# Altium schematic symbol library TitansLib.SchLib: 462 symbols (part 1 of 24)
Pins are listed as number, name and electrical type; pins without a type are passive.

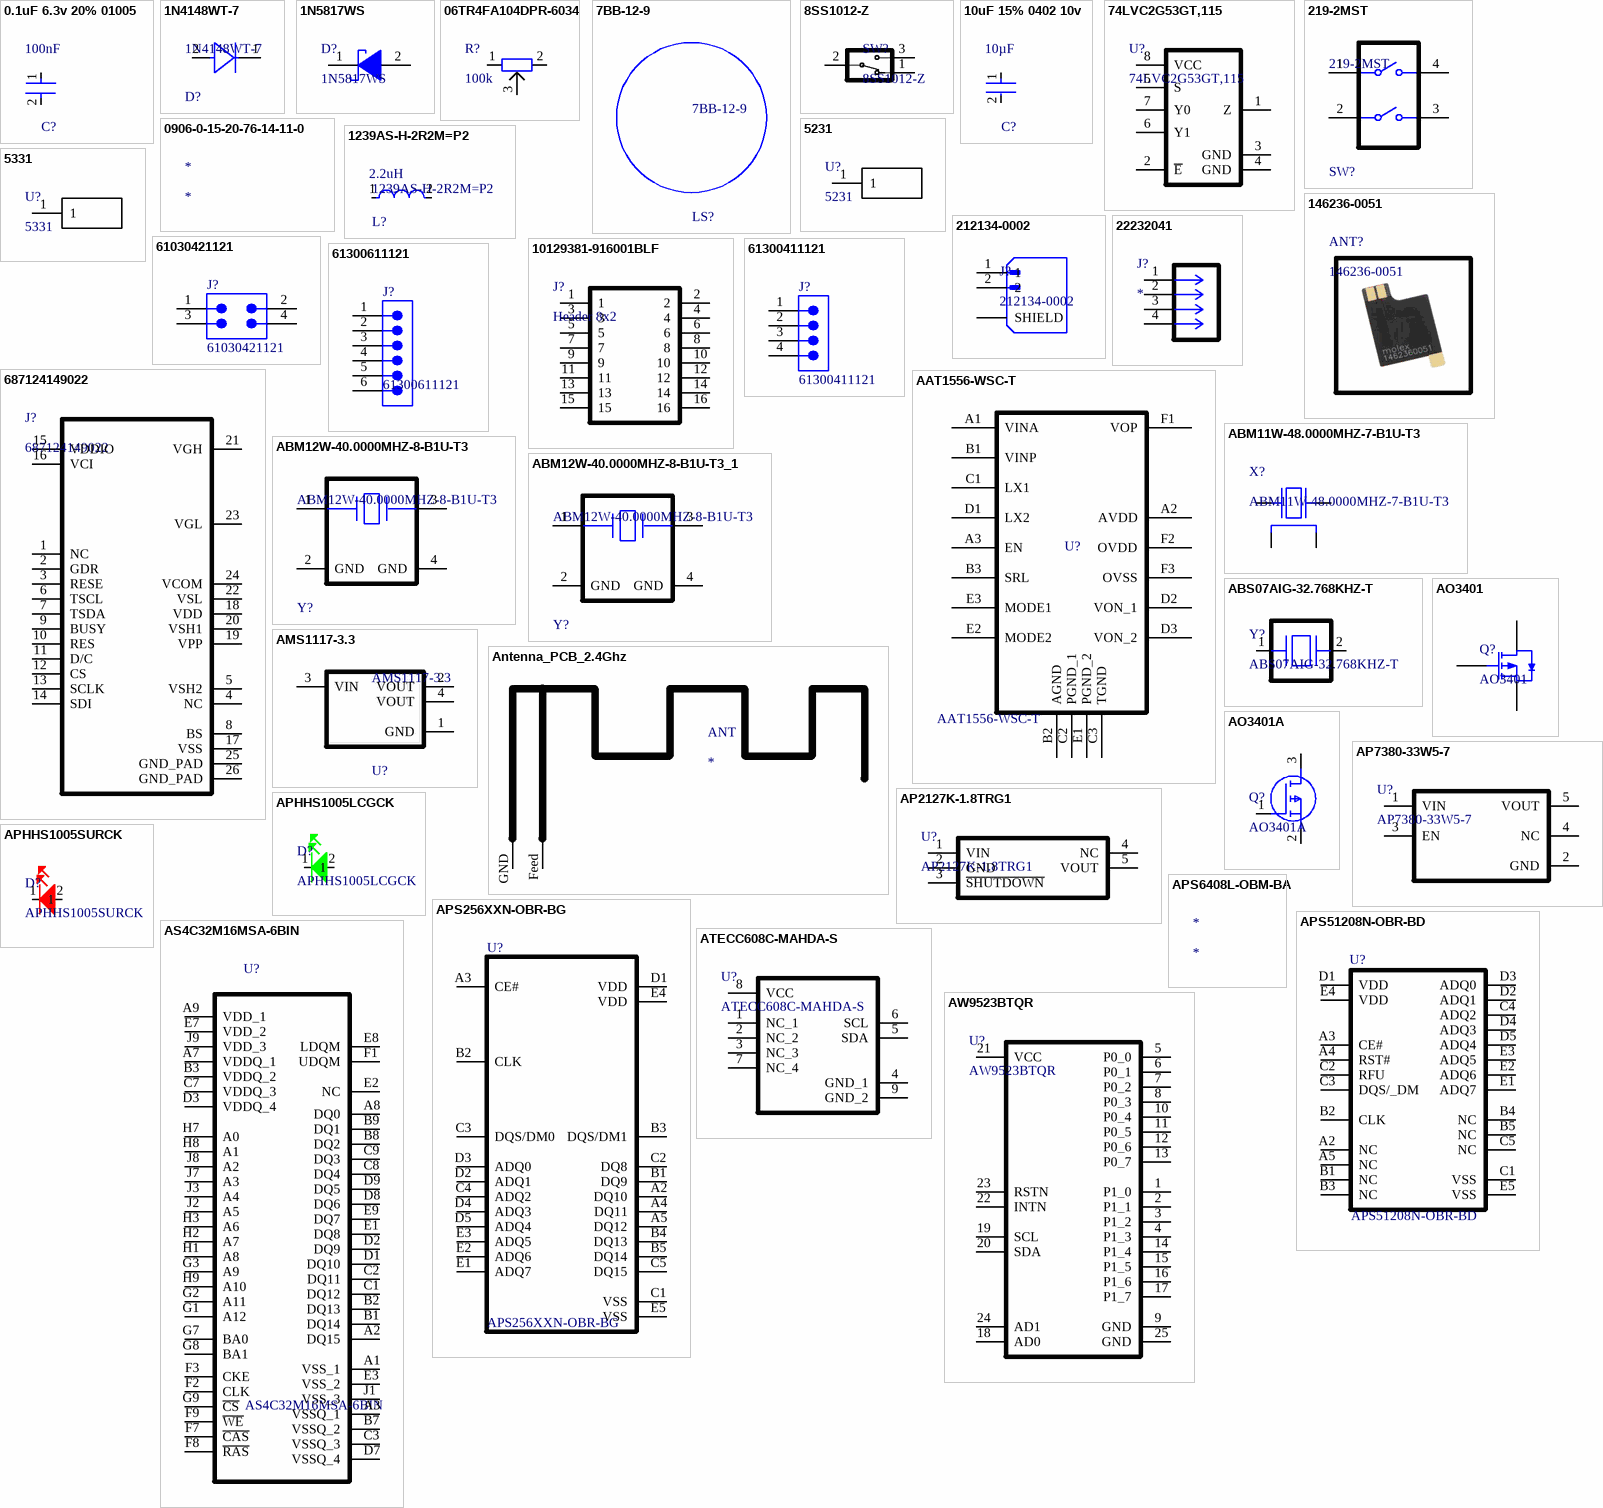
[diagram p0: symbols 0.1uF 6.3v 20% 01005 to AW9523BTQR]

## 0.1uF 6.3v 20% 01005
designator C?, comment value 100nF  (hidden comment: GRM022R60J104ME15L)
Chip Multilayer Ceramic Capacitors for General Purpose, 01005, 0.10uF, X5R, 15%, 20%, 6.3V; Manufacturer: Murata; Manufacturer Lifecycle Status: IN PRODUCTION; Supplier: Avnet; Supplier Part Number: GRM022R60J104ME15L; Manufacturer Part Number: GRM022R60J104ME15L; RoHS: Compliant; Category: Ceramic Capacitors; Stock: 200000; Pricing: 40000=0,00211, 80000=0,00209, 160000=0,00206, 320000=0,00203, 640000=0,002 (USD); Case/Package: 0402; Case Code (Imperial): 1005; Case Code (Metric): 1005; Dielectric: X5R; Dielectric Material: Ceramic; Height: 200µm; Lead Free: Lead Free; Lead Pitch: 5.8928mm; Length: 400µm; Lifecycle Status: Production; Material: Ceramic; Max Operating Temperature: 85°C; Min Operating Temperature: -55°C; Mounting Technology: Surface Mount; Number of Terminals: 2; REACH SVHC: Yes; Schedule B: 8532240020, 8532240020|8532240020, 8532240020|8532240020|8532240020, 8532240020|8532240020|8532240020|8532240020; Termination: SMD/SMT; Thickness: 200µm; Tolerance: 20%; Voltage Rating: 6.3V; Voltage Rating (DC): 6.3V; Weight: 6.010099mg; Width: 200µm; ComponentLink1URL: https://datasheet.octopart.com:443/GRM022R60J104ME15L-Murata-datasheet-165579666.pdf?src-supplier=TME; ComponentLink1Description: https://datasheet.octopart.com:443/GRM022R60J104ME15L-Murata-datasheet-165579666.pdf?src-supplier=TME; ComponentLink2URL: https://datasheet.octopart.com:443/GRM022R60J104ME15L-Murata-datasheet-141273904.pdf?src-supplier=Ciiva; ComponentLink2Description: https://datasheet.octopart.com:443/GRM022R60J104ME15L-Murata-datasheet-141273904.pdf?src-supplier=Ciiva; ComponentLink3URL: https://datasheet.octopart.com:443/GRM022R60J104ME15L-Murata-datasheet-140673554.pdf?src-supplier=Ciiva; ComponentLink3Description: https://datasheet.octopart.com:443/GRM022R60J104ME15L-Murata-datasheet-140673554.pdf?src-supplier=Ciiva; ComponentLink4URL: https://datasheet.octopart.com:443/GRM022R60J104ME15L-Murata-datasheet-138736326.pdf?src-supplier=Ciiva; ComponentLink4Description: https://datasheet.octopart.com:443/GRM022R60J104ME15L-Murata-datasheet-138736326.pdf?src-supplier=Ciiva; ComponentLink5URL: https://datasheet.octopart.com:443/GRM022R60J104ME15L-Murata-datasheet-32479577.pdf?src-supplier=HQonline; ComponentLink5Description: https://datasheet.octopart.com:443/GRM022R60J104ME15L-Murata-datasheet-32479577.pdf?src-supplier=HQonline; ComponentLink6URL: https://datasheet.octopart.com:443/GRM022R60J104ME15L-Murata-datasheet-22122223.pdf?src-supplier=Future+Electronics; ComponentLink6Description: https://datasheet.octopart.com:443/GRM022R60J104ME15L-Murata-datasheet-22122223.pdf?src-supplier=Future+Electronics; ComponentLink7URL: https://datasheet.octopart.com/GRM022R60J104ME15L-Murata-datasheet-12515295.pdf; ComponentLink7Description: https://datasheet.octopart.com/GRM022R60J104ME15L-Murata-datasheet-12515295.pdf; ComponentLink8URL: https://datasheet.octopart.com/GRM022R60J104ME15L-Murata-datasheet-12510076.pdf; ComponentLink8Description: https://datasheet.octopart.com/GRM022R60J104ME15L-Murata-datasheet-12510076.pdf; ComponentLink9URL: https://datasheet.octopart.com/GRM022R60J104ME15L-Murata-datasheet-11978611.pdf; ComponentLink9Description: https://datasheet.octopart.com/GRM022R60J104ME15L-Murata-datasheet-11978611.pdf; ComponentLink10URL: https://datasheet.octopart.com/GRM022R60J104ME15L-Murata-datasheet-10025737.pdf; ComponentLink10Description: https://datasheet.octopart.com/GRM022R60J104ME15L-Murata-datasheet-10025737.pdf; ComponentLink11URL: https://datasheet.octopart.com/GRM022R60J104ME15L-Murata-datasheet-8819587.pdf; ComponentLink11Description: https://datasheet.octopart.com/GRM022R60J104ME15L-Murata-datasheet-8819587.pdf; ComponentLink12URL: https://datasheet.octopart.com/GRM022R60J104ME15L-Murata-datasheet-14395189.pdf; ComponentLink12Description: https://datasheet.octopart.com/GRM022R60J104ME15L-Murata-datasheet-14395189.pdf; ComponentLink13URL: http://sigma.octopart.com:80/reach_statement/Murata-company-16.pdf?src-supplier=Compliance+Statements; ComponentLink13Description: http://sigma.octopart.com:80/reach_statement/Murata-company-16.pdf?src-supplier=Compliance+Statements
footprint CAPC0402X02L (Chip Capacitor, 2-Leads, Body 0.40x0.20mm, IPC High Density)
pins: 1, 2

## 1N4148WT-7
designator D?
DIODE GEN PURP 80V 125MA SOD523; Power Rating: 150mW; Peak Non-Repetitive Surge Current: 2A; Forward Voltage: 1.25V; Reverse Recovery Time: 4ns; Peak Reverse Current: 1uA; Max Repetitive Reverse Voltage (Vrrm): 100V; Capacitance: 2pF; Polarity: Standard; Element Configuration: Single; Forward Current: 250mA; Lead Free: Lead Free; Packaging: Tape and Reel; Length: 0.9mm; Min Operating Temperature: -65°C; Current Rating: 125mA; Max Reverse Voltage (DC): 80V; Width: 1.3mm; Package Quantity: 3000; Output Current: 125mA; Power Dissipation: 150mW; Max Operating Temperature: 150°C; Radiation Hardening: No; Average Rectified Current: 125mA; Height: 0.65mm; Voltage Rating (DC): 80V; Max Surge Current: 2A; Weight: 3.5E-05oz; Recovery Time: 4ns; Max Forward Surge Current (Ifsm): 2A; Contact Plating: Tin; Number of Pins: 2; Mount: Surface Mount; REACH SVHC: No SVHC; Supplier 1: Mouser; Supplier Part Number 1: 621-1N4148WT
footprint 1N4148WT-7 (SODFL, 2-Leads, Body 0,80x1,60mm, IPC Low Density)
pins: 1 C, 2 A

## 1N5817WS
designator D?
Diode Independent 20V 1A Surface Mount SOD-323; Manufacturer Name 1: CBI; Datasheet Link: https://www.lcsc.com/datasheet/C2828424.pdf; Height: 1.35mm; Manufacturer Part Number 1: 1N5817WS; Supplier 1: LCSC; Supplier Link 1: https://www.lcsc.com/product-detail/C2828424.html; Supplier Part Number 1: C2828424; Supplier Unit Price 1: 0.0217
footprint SOD2613X110N
pins: 1 K, 2 A

## 06TR4FA104DPR-6034
designator R?, comment 100k
Trimmer Resistors - SMD 6mm Trimmer 100kOhm 25% HSMD; Manufacturer: CTS; Manufacturer Part Number: 06TR4FA104DPR; Supplier: Mouser; Supplier Part Number: 774-06TR4FA104DPR; RoHS: Yes; Category: Trimmer; Stock: 1498; Pricing: 1=0.67, 10=0.565, 100=0.476, 500=0.42,1 1200=0.361 (USD); Resistor Type: Variable; Reach SVHC Compliant: Yes; RoHS Compliant: Yes; ComponentLink1URL: https://www.mouser.com/ProductDetail/CTS-Electronic-Components/06TR4FA104DPR?qs=dbcCsuKDzFX9WkkidUqJ3g%3D%3D&srsltid=AfmBOop_COOrXBpqK8YDp2e4mr-jayDMNgkXQMHWR55lB1NNJLdGUN-R; ComponentLink1Description: https://datasheet.ciiva.com:443/pdfs/VipMasterIC/IC/SGST/SGST-S-A0006719383/SGST-S-A0006719383-1.pdf?src-supplier=IHS+Markit; ComponentLink2Description: http://www.st.com/resource/en/datasheet/esdavlc6-2bly.pdf?src-supplier=Digikey
footprint TRIMMER
pins: 1, 2, 3 GND (power)

## 7BB-12-9
designator LS?
Audio Indicator Diaphragm Piezo Wire Lead 8000Hz to 10000Hz; Manufacturer: Murata; Value: 8nF; Frequency: 9kHz; Impedance: 1kΩ; Insulation Resistance: 100MΩ; Clock Frequency: 10kHz; Max Supply Voltage: 3V; Outside Diameter: 12mm; Supplier: Mouser; Supplier Part Number: 81-7BB-12-9; Manufacturer Part Number: 7BB-12-9; RoHS: Compliant; Category: Speakers; Pricing: 1=0.35, 10=0.263, 50=0.219, 100=0.203, 1000=0.163, 10000=0.161 (USD); Case/Package: SMD/SMT; Country of Origin: Thailand; Diameter: 12mm; Height: 320µm; Housing Material: Brass; Introduction Date: 2015-12-27; Lead Free: Lead Free; Lifecycle Status: Obsolete; Max Operating Temperature: 70°C; Min Operating Temperature: -20°C; Mounting Technology: Surface Mount; Packaging: Bulk; Radiation Hardening: No; REACH SVHC: No; Schedule B: 8531800040, 8531800040|8531800040|8531800040|8531800040|8531800040; Self Resonant Frequency: 9kHz; Termination: Wire; ComponentLink1URL: https://datasheet.octopart.com:443/7BB-12-9-Murata-datasheet-14713187.pdf?src-supplier=element14+APAC; ComponentLink1Description: https://datasheet.octopart.com:443/7BB-12-9-Murata-datasheet-14713187.pdf?src-supplier=element14+APAC; ComponentLink2URL: https://datasheet.octopart.com:443/7BB-12-9-Murata-datasheet-514046.pdf?src-supplier=Newark; ComponentLink2Description: https://datasheet.octopart.com:443/7BB-12-9-Murata-datasheet-514046.pdf?src-supplier=Newark; ComponentLink3URL: https://datasheet.octopart.com:443/7BB-12-9-Murata-datasheet-138706124.pdf?src-supplier=Ciiva; ComponentLink3Description: https://datasheet.octopart.com:443/7BB-12-9-Murata-datasheet-138706124.pdf?src-supplier=Ciiva; ComponentLink4URL: https://datasheet.octopart.com:443/7BB-12-9-Murata-datasheet-118636348.pdf?src-supplier=ODG+(Origin+Data+Global); ComponentLink4Description: https://datasheet.octopart.com:443/7BB-12-9-Murata-datasheet-118636348.pdf?src-supplier=ODG+(Origin+Data+Global); ComponentLink5URL: https://datasheet.octopart.com:443/7BB-12-9-Murata-datasheet-140568401.pdf?src-supplier=Arrow.cn; ComponentLink5Description: https://datasheet.octopart.com:443/7BB-12-9-Murata-datasheet-140568401.pdf?src-supplier=Arrow.cn; ComponentLink6URL: https://datasheet.octopart.com/7BB-12-9-Murata-datasheet-32036507.pdf; ComponentLink6Description: https://datasheet.octopart.com/7BB-12-9-Murata-datasheet-32036507.pdf; ComponentLink7URL: https://datasheet.octopart.com:443/7BB-12-9-Murata-datasheet-17793854.pdf?src-supplier=Farnell; ComponentLink7Description: https://datasheet.octopart.com:443/7BB-12-9-Murata-datasheet-17793854.pdf?src-supplier=Farnell; ComponentLink8URL: https://datasheet.octopart.com:443/7BB-12-9-Murata-datasheet-11978949.pdf?src-supplier=_legacy+Avnet; ComponentLink8Description: https://datasheet.octopart.com:443/7BB-12-9-Murata-datasheet-11978949.pdf?src-supplier=_legacy+Avnet; ComponentLink9URL: https://datasheet.octopart.com:443/7BB-12-9-Murata-datasheet-166693676.pdf?src-supplier=TME; ComponentLink9Description: https://datasheet.octopart.com:443/7BB-12-9-Murata-datasheet-166693676.pdf?src-supplier=TME; ComponentLink10URL: https://datasheet.octopart.com:443/7BB-12-9-Murata-datasheet-541598.pdf?src-supplier=Future+Electronics; ComponentLink10Description: https://datasheet.octopart.com:443/7BB-12-9-Murata-datasheet-541598.pdf?src-supplier=Future+Electronics; ComponentLink11URL: http://sigma.octopart.com:80/reach_statement/Murata-company-16.pdf?src-supplier=Compliance+Statements; ComponentLink11Description: http://sigma.octopart.com:80/reach_statement/Murata-company-16.pdf?src-supplier=Compliance+Statements
footprint 7BB-12-9

## 8SS1012-Z
designator SW?
Switch Slide ON ON SPDT Top Slide 6A 250VAC 30VDC 100000Cycles PC Pins Thru-Hole Bag; Manufacturer_Name: Nidec Copal Electronics; Manufacturer: Nidec Copal; Actuator Length: 5mm; Contact Style: Non-Shorting; Current Rating: 4A; Electrical Life: 30kcycles; Mechanical Life: 100kcycles; Switch Function: On-On; Switch Travel: 2.2mm; Voltage Rating (AC): 125V; Voltage Rating (DC): 30V; Type: Slide Switches; Copyright: Copyright (C) 2025 Ultra Librarian. All rights reserved.; Manufacturer_Part_Number: 8SS1012-Z; RefDes: RefDes; Supplier: Arrow Electronics; Supplier Part Number: 8SS1012-Z; Manufacturer Part Number: 8SS1012-Z; RoHS: Compliant; Category: Slide Switches; Stock: 1202; Pricing: 2=1,567 (USD); Contact Current Rating: 6A; Contact Plating: Silver; Export Control Classification Number (ECCN) Code: EAR99; Harmonized Tariff Schedule (HTS) Code: 8536.50.70.00; Introduction Date: 2016-11-16; Lifecycle Status: Production; Max Operating Temperature: 85°C; Min Operating Temperature: -30°C; Mounting Technology: Through Hole; Orientation: Vertical; Termination: PC Pin; Throw Configuration: SPDT; ComponentLink1URL: https://datasheet.octopart.com:443/8SS1012-Z-Nidec-Copal-datasheet-180925849.pdf?src-supplier=IHS; ComponentLink1Description: https://datasheet.octopart.com:443/8SS1012-Z-Nidec-Copal-datasheet-180925849.pdf?src-supplier=IHS; ComponentLink2URL: https://datasheet.octopart.com:443/8SS1012-Z-Nidec-datasheet-158724552.pdf?src-supplier=RS+(Formerly+Allied+Electronics); ComponentLink2Description: https://datasheet.octopart.com:443/8SS1012-Z-Nidec-datasheet-158724552.pdf?src-supplier=RS+(Formerly+Allied+Electronics)
footprint 8SS1012-Z_NDC
pins: 1, 2, 3

## 10uF 15% 0402 10v
designator C?, comment value 10µF  (hidden comment: GRM155R61A106ME11J)
Cap, Mlcc, 10Uf, X5R, 10V, 0402 Rohs Compliant: Yes |Murata Manufacturing Co., Ltd. GRM155R61A106ME11J; Manufacturer: Murata; Manufacturer Lifecycle Status: IN PRODUCTION; Dielectric Material: Ceramic; Tolerance: 20%; Supplier 1: DigiKey; Supplier Part Number 1: 490-GRM155R61A106ME11JCT-ND; Supplier 2: DigiKey; Supplier Part Number 2: 490-GRM155R61A106ME11JDKR-ND; Supplier: Arrow Electronics; Supplier Part Number: GRM155R61A106ME11J; Manufacturer Part Number: GRM155R61A106ME11J; RoHS: Compliant; Category: Ceramic Capacitors; Stock: 400000; Pricing: 40000=0,1108, 80000=0,1097, 120000=0,1085, 200000=0,1075, 240000=0,1064, 400000=0,1052 (USD); Case/Package: 0402; Country of Origin: Philippines; Dielectric: X5R; Export Control Classification Number (ECCN) Code: EAR99; Height: 500µm; Harmonized Tariff Schedule (HTS) Code: 8532.24.00.20; Introduction Date: 2018-10-26; Length: 1mm; Lifecycle Status: Production; Material: Ceramic; Max Operating Temperature: 85°C; Min Operating Temperature: -55°C; Mounting Technology: Surface Mount; Number of Terminals: 2; REACH SVHC: Yes; Thickness: 500µm; Voltage Rating: 10V; Voltage Rating (DC): 10V; Width: 500µm; ComponentLink1URL: https://datasheet.octopart.com:443/GRM155R61A106ME11J-Murata-datasheet-165579666.pdf?src-supplier=TME; ComponentLink1Description: https://datasheet.octopart.com:443/GRM155R61A106ME11J-Murata-datasheet-165579666.pdf?src-supplier=TME; ComponentLink2URL: https://datasheet.octopart.com:443/GRM155R61A106ME11J-Murata-datasheet-141266224.pdf?src-supplier=Ciiva; ComponentLink2Description: https://datasheet.octopart.com:443/GRM155R61A106ME11J-Murata-datasheet-141266224.pdf?src-supplier=Ciiva; ComponentLink3URL: https://datasheet.octopart.com:443/GRM155R61A106ME11J-Murata-datasheet-140689744.pdf?src-supplier=Ciiva; ComponentLink3Description: https://datasheet.octopart.com:443/GRM155R61A106ME11J-Murata-datasheet-140689744.pdf?src-supplier=Ciiva; ComponentLink4URL: https://datasheet.octopart.com:443/GRM155R61A106ME11J-Murata-datasheet-138740692.pdf?src-supplier=Ciiva; ComponentLink4Description: https://datasheet.octopart.com:443/GRM155R61A106ME11J-Murata-datasheet-138740692.pdf?src-supplier=Ciiva; ComponentLink5URL: https://datasheet.octopart.com/GRM155R61A106ME11J-Murata-datasheet-12515295.pdf; ComponentLink5Description: https://datasheet.octopart.com/GRM155R61A106ME11J-Murata-datasheet-12515295.pdf; ComponentLink6URL: https://datasheet.octopart.com/GRM155R61A106ME11J-Murata-datasheet-12510076.pdf; ComponentLink6Description: https://datasheet.octopart.com/GRM155R61A106ME11J-Murata-datasheet-12510076.pdf; ComponentLink7URL: https://datasheet.octopart.com/GRM155R61A106ME11J-Murata-datasheet-11978611.pdf; ComponentLink7Description: https://datasheet.octopart.com/GRM155R61A106ME11J-Murata-datasheet-11978611.pdf; ComponentLink8URL: https://datasheet.octopart.com/GRM155R61A106ME11J-Murata-datasheet-10025737.pdf; ComponentLink8Description: https://datasheet.octopart.com/GRM155R61A106ME11J-Murata-datasheet-10025737.pdf; ComponentLink9URL: https://datasheet.octopart.com/GRM155R61A106ME11J-Murata-datasheet-8819587.pdf; ComponentLink9Description: https://datasheet.octopart.com/GRM155R61A106ME11J-Murata-datasheet-8819587.pdf; ComponentLink10URL: http://sigma.octopart.com:80/reach_statement/Murata-company-16.pdf?src-supplier=Compliance+Statements; ComponentLink10Description: http://sigma.octopart.com:80/reach_statement/Murata-company-16.pdf?src-supplier=Compliance+Statements
footprint C0402_H0P7
pins: 1, 2

## 74LVC2G53GT,115
designator U?
Multiplexer Switch ICs 74LVC2G53GT/SOT833/XSON8; Manufacturer 1: Nexperia; Datasheet Link: https://assets.nexperia.com/documents/data-sheet/74LVC2G53.pdf; Height: 0.5mm; Manufacturer Part Number 1: 74LVC2G53GT,115; Supplier Part Number 1: 771-LVC2G53GT115; Supplier Link 1: https://www.mouser.co.uk/ProductDetail/Nexperia/74LVC2G53GT115?qs=me8TqzrmIYV6KbsilWq%2FyA%3D%3D; Supplier Unit Price 1: 0.23; Supplier 1: Mouser
footprint 74AVC9112GTX
pins: 1 Z, 2 ~{E}, 3 GND, 4 GND, 5 S, 6 Y1, 7 Y0, 8 VCC

## 219-2MST
designator SW?
Switch DIP ON OFF SPST 2 Raised Slide 0.1A 20VDC Gull Wing 2000Cycles 2.54mm SMD Tube; Manufacturer: CTS Components; Actuator Length: 254µm; Actuator Material: Polyethylene; Contact Current Rating: 100mA; Contact Resistance: 25mΩ; Electrical Life: 2kcycles; Insulation Resistance: 1GΩ; Max Voltage Rating (DC): 20V; Number of Circuits: 2; Sealable: BOTTOM SEALED, TOP TAPE SEALED; Voltage Rating (DC): 50V; Washable: Yes; Supplier: DigiKey; Supplier Part Number: CT2192MST-ND; Manufacturer Part Number: 219-2MST; RoHS: Compliant; Category: DIP Switches; Stock: 25073; Pricing: 1=0.66, 10=0.562, 85=0.47412, 170=0.44741, 255=0.43247, 510=0.40835, 1020=0.3861, 2550=0.35972, 5015=0.34249 (USD); Contact Material: Copper; Contact Plating: Gold; Current Rating: 100mA; Depth: 9.91mm; Dielectric Material: Polyethylene; Height: 4.05mm; Housing Material: Polyethylene; Lead Free: Lead Free; Length: 6.7mm; Life (Cycles): 2kcycles; Lifecycle Status: Production; Max Current Rating: 100mA; Max Operating Temperature: 85°C; Mechanical Life: 2kcycles; Min Operating Temperature: -55°C; Mounting Technology: Surface Mount; Number of Positions: 2; Pitch: 2.54mm; Radiation Hardening: No; REACH SVHC: Yes; Terminal Pitch: 2.54mm; Termination: Gull Wing; Throw Configuration: SPST; ComponentLink1URL: https://datasheet.octopart.com:443/219-2MST-CTS-Components-datasheet-178475457.pdf?src-supplier=IHS; ComponentLink1Description: https://datasheet.octopart.com:443/219-2MST-CTS-Components-datasheet-178475457.pdf?src-supplier=IHS; ComponentLink2URL: https://datasheet.octopart.com:443/219-2MST-CTS-Components-datasheet-180382354.pdf?src-supplier=IHS; ComponentLink2Description: https://datasheet.octopart.com:443/219-2MST-CTS-Components-datasheet-180382354.pdf?src-supplier=IHS; ComponentLink3URL: https://datasheet.octopart.com:443/219-2MST-CTS-Components-datasheet-86397250.pdf?src-supplier=Upverter; ComponentLink3Description: https://datasheet.octopart.com:443/219-2MST-CTS-Components-datasheet-86397250.pdf?src-supplier=Upverter; ComponentLink4URL: https://datasheet.octopart.com:443/219-2MST-CTS-Components-datasheet-5314881.pdf?src-supplier=_legacy+Avnet; ComponentLink4Description: https://datasheet.octopart.com:443/219-2MST-CTS-Components-datasheet-5314881.pdf?src-supplier=_legacy+Avnet; ComponentLink5URL: https://datasheet.octopart.com:443/219-2MST-CTS-Components-datasheet-510507.pdf?src-supplier=Factory+Futures; ComponentLink5Description: https://datasheet.octopart.com:443/219-2MST-CTS-Components-datasheet-510507.pdf?src-supplier=Factory+Futures; ComponentLink6URL: https://datasheet.octopart.com:443/219-2MST-CTS-Components-datasheet-154730681.pdf?src-supplier=Electro+Sonic; ComponentLink6Description: https://datasheet.octopart.com:443/219-2MST-CTS-Components-datasheet-154730681.pdf?src-supplier=Electro+Sonic; ComponentLink7URL: https://datasheet.octopart.com:443/219-2MST-CTS-Components-datasheet-7561567.pdf?src-supplier=Jameco; ComponentLink7Description: https://datasheet.octopart.com:443/219-2MST-CTS-Components-datasheet-7561567.pdf?src-supplier=Jameco; ComponentLink8URL: https://datasheet.octopart.com:443/219-2MST-CTS-Components-datasheet-122307.pdf?src-supplier=DigiKey; ComponentLink8Description: https://datasheet.octopart.com:443/219-2MST-CTS-Components-datasheet-122307.pdf?src-supplier=DigiKey; Supplier 1: DigiKey; Supplier Part Number 1: CT2192MST-ND; Supplier 2: Mouser; Supplier Part Number 2: 774-2192MST
footprint 219-2MST
pins: 1, 2, 3, 4

## 0906-0-15-20-76-14-11-0
designator *
Circuit Board Hardware - PCB Spring-Loaded Pin with a Standard Tail; Manufacturer: Mill-Max; Manufacturer Part Number: 0906-0-15-20-76-14-11-0; Body Material: Brass; Current Rating: 2A; Plating: Gold; Value: 20mΩ; Supplier: DigiKey; Supplier Part Number: ED8180-ND; RoHS: Compliant; Category: Rectangular Connectors; Stock: 46796; Pricing: 1=0.7, 10=0.591, 25=0.554, 50=0.5276, 100=0.5023, 250=0.47084, 500=0.44832, 1000=0.42691, 2500=0.40018 (USD); Case/Package: 0906; Color: Gold; Contact Gender: Female; Contact Material: Brass; Contact Plating: Gold; Exterior Housing Material: Brass; Height: 5.2324mm; Lifecycle Status: Production; Mounting Technology: PCB, Panel, Through Hole; Number of Rows: 1; REACH SVHC: No; Termination: Solder; ComponentLink1URL: https://datasheet.octopart.com:443/0906-0-15-20-76-14-11-0-Mill-Max-datasheet-180665642.pdf?src-supplier=IHS; ComponentLink1Description: https://datasheet.octopart.com:443/0906-0-15-20-76-14-11-0-Mill-Max-datasheet-180665642.pdf?src-supplier=IHS; ComponentLink2URL: https://datasheet.octopart.com:443/0906-0-15-20-76-14-11-0-Mill-Max-datasheet-3883.pdf?src-supplier=element14+APAC; ComponentLink2Description: https://datasheet.octopart.com:443/0906-0-15-20-76-14-11-0-Mill-Max-datasheet-3883.pdf?src-supplier=element14+APAC; ComponentLink3URL: https://datasheet.octopart.com:443/0906-0-15-20-76-14-11-0-Mill-Max-datasheet-11892231.pdf?src-supplier=Farnell; ComponentLink3Description: https://datasheet.octopart.com:443/0906-0-15-20-76-14-11-0-Mill-Max-datasheet-11892231.pdf?src-supplier=Farnell; ComponentLink4URL: https://datasheet.octopart.com:443/0906-0-15-20-76-14-11-0-Mill-Max-datasheet-21070163.pdf?src-supplier=Sager+Electronics; ComponentLink4Description: https://datasheet.octopart.com:443/0906-0-15-20-76-14-11-0-Mill-Max-datasheet-21070163.pdf?src-supplier=Sager+Electronics; ComponentLink5URL: https://datasheet.octopart.com:443/0906-0-15-20-76-14-11-0-Mill-Max-datasheet-155663826.pdf?src-supplier=Sager+Electronics; ComponentLink5Description: https://datasheet.octopart.com:443/0906-0-15-20-76-14-11-0-Mill-Max-datasheet-155663826.pdf?src-supplier=Sager+Electronics; ComponentLink6URL: https://datasheet.octopart.com:443/0906-0-15-20-76-14-11-0-Mill-Max-datasheet-21070162.pdf?src-supplier=Sager+Electronics; ComponentLink6Description: https://datasheet.octopart.com:443/0906-0-15-20-76-14-11-0-Mill-Max-datasheet-21070162.pdf?src-supplier=Sager+Electronics; ComponentLink7URL: https://datasheet.octopart.com:443/0906-0-15-20-76-14-11-0-Mill-Max-datasheet-15704026.pdf?src-supplier=RS+(Formerly+Allied+Electronics); ComponentLink7Description: https://datasheet.octopart.com:443/0906-0-15-20-76-14-11-0-Mill-Max-datasheet-15704026.pdf?src-supplier=RS+(Formerly+Allied+Electronics); ComponentLink8URL: https://datasheet.octopart.com:443/0906-0-15-20-76-14-11-0-Mill-Max-datasheet-13530822.pdf?src-supplier=Factory+Futures; ComponentLink8Description: https://datasheet.octopart.com:443/0906-0-15-20-76-14-11-0-Mill-Max-datasheet-13530822.pdf?src-supplier=Factory+Futures; ComponentLink9URL: https://datasheet.octopart.com:443/0906-0-15-20-76-14-11-0-Mill-Max-datasheet-12530742.pdf?src-supplier=Factory+Futures; ComponentLink9Description: https://datasheet.octopart.com:443/0906-0-15-20-76-14-11-0-Mill-Max-datasheet-12530742.pdf?src-supplier=Factory+Futures; ComponentLink10URL: https://datasheet.octopart.com:443/0906-0-15-20-76-14-11-0-Mill-Max-datasheet-12538023.pdf?src-supplier=Future+Electronics; ComponentLink10Description: https://datasheet.octopart.com:443/0906-0-15-20-76-14-11-0-Mill-Max-datasheet-12538023.pdf?src-supplier=Future+Electronics; ComponentLink11URL: https://datasheet.octopart.com:443/0906-0-15-20-76-14-11-0-Mill-Max-datasheet-11973309.pdf?src-supplier=Arrow+Electronics; ComponentLink11Description: https://datasheet.octopart.com:443/0906-0-15-20-76-14-11-0-Mill-Max-datasheet-11973309.pdf?src-supplier=Arrow+Electronics; ComponentLink12URL: https://datasheet.octopart.com:443/0906-0-15-20-76-14-11-0-Mill-Max-datasheet-8455495.pdf?src-supplier=element14; ComponentLink12Description: https://datasheet.octopart.com:443/0906-0-15-20-76-14-11-0-Mill-Max-datasheet-8455495.pdf?src-supplier=element14

## 1239AS-H-2R2M=P2
designator L?  Inductance: 2.2uH
Shielded Wirewound Inductor 2.2uH 20% 2000mA 0.108Ω 1008 (2520); Core Material: Ferrite; Test Frequency: 1MHz; DC Resistance (DCR): 108mR; Current Rating: 2.2A; Resistor Type: Wirewound; Case/Package: 1008; Length: 0.098inch; Min Operating Temperature: -40°C; Max Operating Temperature: 85°C; Mount: Surface Mount; Shielding: Shielded; Packaging: Tape and Reel; Case Code (Imperial): 1008; Width: 0.079inch; Height - Seated (Max): 0.047inch; Case Code (Metric): 2520; Tolerance: 20%
footprint 1239AS-H-2R2M=P2 (Chip Inductor, 2-Leads, Body 2,50x2,00mm, IPC Medium Density)
pins: 1, 2

## 5231
designator U?
Cylindrical Battery Contacts, Clips, Holders & Springs A/AA/9V Battery CLIP; Manufacturer: Keystone; Number of Batteries: 1; Supplier: DigiKey; Supplier Part Number: 36-5231-ND; Manufacturer Part Number: 5231; RoHS: Compliant; Category: Coaxial / RF Cable Assemblies; Stock: 5285; Pricing: 1=0.25, 10=0.204, 25=0.1896, 100=0.1693, 500=0.16, 5000=0.15 (USD); Color: Silver; Contact Plating: Nickel, Tin; Diameter: 12mm; Lead Free: Lead Free; Lifecycle Status: Production; Material: Steel; Mounting Technology: PCB, Surface Mount; Number of Ports: 1; Number of Terminals: 1; Orientation: Right Angle; Packaging: Bulk; REACH SVHC: Yes; Termination: SMD/SMT; ComponentLink1URL: https://datasheet.octopart.com:443/5231-Keystone-datasheet-15716155.pdf?src-supplier=Future+Electronics; ComponentLink1Description: https://datasheet.octopart.com:443/5231-Keystone-datasheet-15716155.pdf?src-supplier=Future+Electronics; ComponentLink2URL: https://datasheet.octopart.com:443/5231-Keystone-datasheet-110727435.pdf?src-supplier=Future+Electronics; ComponentLink2Description: https://datasheet.octopart.com:443/5231-Keystone-datasheet-110727435.pdf?src-supplier=Future+Electronics; ComponentLink3URL: https://datasheet.octopart.com:443/5231-Keystone-datasheet-167984.pdf?src-supplier=Future+Electronics; ComponentLink3Description: https://datasheet.octopart.com:443/5231-Keystone-datasheet-167984.pdf?src-supplier=Future+Electronics; ComponentLink4URL: https://datasheet.octopart.com:443/5231-Keystone-datasheet-62112890.pdf?src-supplier=IHS; ComponentLink4Description: https://datasheet.octopart.com:443/5231-Keystone-datasheet-62112890.pdf?src-supplier=IHS; ComponentLink5URL: https://datasheet.octopart.com:443/5231-Keystone-datasheet-11903.pdf?src-supplier=DigiKey; ComponentLink5Description: https://datasheet.octopart.com:443/5231-Keystone-datasheet-11903.pdf?src-supplier=DigiKey; ComponentLink6URL: https://datasheet.octopart.com:443/5231-Keystone-datasheet-21202864.pdf?src-supplier=Newark; ComponentLink6Description: https://datasheet.octopart.com:443/5231-Keystone-datasheet-21202864.pdf?src-supplier=Newark; ComponentLink7URL: https://datasheet.octopart.com:443/5231-Keystone-datasheet-10930007.pdf?src-supplier=RS+(Formerly+Allied+Electronics); ComponentLink7Description: https://datasheet.octopart.com:443/5231-Keystone-datasheet-10930007.pdf?src-supplier=RS+(Formerly+Allied+Electronics); ComponentLink8URL: https://datasheet.octopart.com:443/5231-Keystone-datasheet-17577447.pdf?src-supplier=TME; ComponentLink8Description: https://datasheet.octopart.com:443/5231-Keystone-datasheet-17577447.pdf?src-supplier=TME; Supplier 1: Mouser; Supplier Part Number 1: 534-5231; Supplier 2: DigiKey; Supplier Part Number 2: 36-5231-ND
footprint 5231
pins: 1

## 5331
designator U?
Cylindrical Battery Contacts, Clips, Holders & Springs A/AA/9V Battery CLIP; Number of Batteries: 1; Supplier: DigiKey; Mounting Technology: PCB, Surface Mount; Number of Ports: 1; Number of Terminals: 1; Orientation: Right Angle; Packaging: Bulk; REACH SVHC: Yes; Termination: SMD/SMT
footprint 5331
pins: 1

## 146236-0051
designator ANT?
Rectangular Near Field Communication (NFC) Antenna, without Ferrite, 15.00mm by 15.00mm by 0.17mm; Manufacturer: Molex; Supplier: Newark; Supplier Part Number: 94AH5917; Manufacturer Part Number: 146236-0051; RoHS: Yes; Category: RF Antennas; Stock: 2714; Pricing: 1=0.841, 10=0.597, 25=0.563, 50=0.546, 100=0.529, 250=0.507, 500=0.486, 1000=0.459 (USD); ComponentLink1URL: http://datasheet.octopart.com/1462360051-Molex-datasheet-147910554.pdf?src-supplier=Avnet; ComponentLink1Description: http://datasheet.octopart.com/1462360051-Molex-datasheet-147910554.pdf?src-supplier=Avnet; ComponentLink2URL: http://datasheet.octopart.com/1462360051-Molex-datasheet-147910554.pdf?src-supplier=Onlinecomponents.com; ComponentLink2Description: http://datasheet.octopart.com/1462360051-Molex-datasheet-147910554.pdf?src-supplier=Onlinecomponents.com; ComponentLink3URL: http://datasheet.octopart.com/1462360051-Molex-datasheet-147910554.pdf?src-supplier=Rs; ComponentLink3Description: http://datasheet.octopart.com/1462360051-Molex-datasheet-147910554.pdf?src-supplier=Rs; ComponentLink4URL: http://datasheet.octopart.com/1462360051-Molex-datasheet-147910554.pdf?src-supplier=Farnell; ComponentLink4Description: http://datasheet.octopart.com/1462360051-Molex-datasheet-147910554.pdf?src-supplier=Farnell; ComponentLink5URL: http://datasheet.octopart.com/1462360051-Molex-datasheet-147910554.pdf?src-supplier=Mouser; ComponentLink5Description: http://datasheet.octopart.com/1462360051-Molex-datasheet-147910554.pdf?src-supplier=Mouser; ComponentLink6URL: http://datasheet.octopart.com/1462360051-Molex-datasheet-147910554.pdf?src-supplier=Digikey; ComponentLink6Description: http://datasheet.octopart.com/1462360051-Molex-datasheet-147910554.pdf?src-supplier=Digikey; ComponentLink7URL: http://datasheet.octopart.com/1462360051-Molex-datasheet-147910554.pdf?src-supplier=Newark; ComponentLink7Description: http://datasheet.octopart.com/1462360051-Molex-datasheet-147910554.pdf?src-supplier=Newark; ComponentLink8URL: http://datasheet.octopart.com/1462360051-Molex-datasheet-147910554.pdf?src-supplier=Electro+Sonic; ComponentLink8Description: http://datasheet.octopart.com/1462360051-Molex-datasheet-147910554.pdf?src-supplier=Electro+Sonic; ComponentLink9URL: http://datasheet.octopart.com/1462360051-Molex-datasheet-147910554.pdf?src-supplier=Heilind+Electronics; ComponentLink9Description: http://datasheet.octopart.com/1462360051-Molex-datasheet-147910554.pdf?src-supplier=Heilind+Electronics; Supplier 1: Digikey; Supplier Part Number 1: 900-1462360051-ND; Supplier 2: Mouser; Supplier Part Number 2: 538-146236-0051

## 212134-0002
designator J?
Connector Header Surface Mount, Right Angle 2 position 0.039 (1.00mm); MF: Molex; MP: 2121340002; Availability: In Stock; Price: None; Package: None; SnapEDA_Link: https://www.snapeda.com/parts/2121340002/Molex/view-part/?ref=snap; Purchase-URL: https://pricing.snapeda.com/search/part/2121340002/?ref=eda; Value: *; Check_prices: https://www.snapeda.com/parts/2121340002/Molex/view-part/?ref=eda; Supplier 1: DigiKey; Supplier Part Number 1: 900-2121340002CT-ND; Supplier 2: DigiKey; Supplier Part Number 2: 900-2121340002DKR-ND
footprint MOLEX_212134-0002
footprint MOLEX_212134-0002 (Surface mount pin header connector, right angle, 2 positions, 0.039" (1.00mm))
pins: 1, 2, S1 SHIELD, S2 SHIELD

## 10129381-916001BLF
designator J?, comment Header 8x2
Header Dr Vt Th 2X8-10129381-916001BLF | Amphenol Fci (amphenol Cs) 10129381916001BLF; Manufacturer: Amphenol Communications Solutions; Contact Resistance: 20mΩ; Current Rating: 3A; Dielectric Material: Polyethylene; Insulation Resistance: 1GΩ; Operating Force: 2.5N; Row Spacing: 2.54mm; Supplier: DigiKey; Supplier Part Number: 10129381-916001BLF-ND; Manufacturer Part Number: 10129381-916001BLF; RoHS: Compliant; Category: Card Edge Connectors; Stock: 10420; Pricing: 1=0.27, 10=0.233, 100=0.1979, 500=0.17658, 1200=0.16598, 6000=0.14816, 10800=0.14214 (USD); China RoHS: Compliant; Contact Gender: Male; Lifecycle Status: Production; Max Operating Temperature: 105°C; Min Operating Temperature: -55°C; Pins: 16; Number of Rows: 2; REACH SVHC: Yes; Terminal Pitch: 2.54mm; ComponentLink1URL: https://datasheet.octopart.com:443/10129381-916001BLF-Amphenol-Communications-Solutions-datasheet-168215084.pdf?src-supplier=IHS; ComponentLink1Description: https://datasheet.octopart.com:443/10129381-916001BLF-Amphenol-Communications-Solutions-datasheet-168215084.pdf?src-supplier=IHS; ComponentLink2URL: https://datasheet.octopart.com:443/10129381-916001BLF-Amphenol-ICC-datasheet-100454231.pdf?src-supplier=Farnell; ComponentLink2Description: https://datasheet.octopart.com:443/10129381-916001BLF-Amphenol-ICC-datasheet-100454231.pdf?src-supplier=Farnell; ComponentLink3URL: https://datasheet.octopart.com:443/10129381-916001BLF-Amphenol-Communications-Solutions-datasheet-157857145.pdf?src-supplier=Farnell; ComponentLink3Description: https://datasheet.octopart.com:443/10129381-916001BLF-Amphenol-Communications-Solutions-datasheet-157857145.pdf?src-supplier=Farnell; ComponentLink4URL: https://datasheet.octopart.com:443/10129381-916001BLF-Amphenol-Communications-Solutions-datasheet-182900135.pdf?src-supplier=Electro+Sonic; ComponentLink4Description: https://datasheet.octopart.com:443/10129381-916001BLF-Amphenol-Communications-Solutions-datasheet-182900135.pdf?src-supplier=Electro+Sonic
footprint Header 8x2
pins: 1, 2, 3, 4, 5, 6, 7, 8, 9, 10, 11, 12, 13, 14, 15, 16

## 22232041
designator J?
Conn Wire to Board HDR 4 POS 2.54mm Solder ST Top Entry Thru-Hole KKÂ® Bag; MF: Molex; MP: 22232041; SnapEDA_Link: https://www.snapeda.com/parts/22232041/Molex/view-part/?ref=snap; Package: None; Value: *; Check_prices: https://www.snapeda.com/parts/22232041/Molex/view-part/?ref=eda
footprint CONN_A-6373-04A_MOL
pins: 1, 2, 3, 4

## 61030421121
designator J?
SMT Vertical Pin Header WR-PHD, Pitch 2.54 mm, Dual Row, 4 pins; Operating Supply Voltage: 250V; Connector Type: Male Pin; Number of Contacts: 4; Gender: Male; Pitch: 2.54mm; Current Rating: 3A; Contact Resistance: 20mΩ; Number of Rows: 2; Mount: Surface Mount; Contact Material: Copper; Contact Mating Length: 5.9944mm; Lead Pitch: 2.54mm; Termination: Solder; Color: Black; Orientation: Vertical; Packaging: Tape and Reel; Number of Pins: 4; Contact Plating: Gold; Row Spacing: 2.54mm; RoHS: Compliant; Number of Positions: 4
footprint 61030421121 (Pin Header, pitch 2.54 mm, SMD, Vertical, dual row, 4p)
pins: 1, 2, 3, 4

## 61300411121
designator J?
Conn Unshrouded Header HDR 4 POS 2.54mm Solder ST Thru-Hole Bag; Manufacturer: Wurth Elektronik; Connector Type: Male Pin; Contact Resistance: 20mΩ; Current Rating: 3A; Gender: Male; Insulation Resistance: 1GΩ; Number of Contacts: 4; Operating Supply Voltage: 250V; Supplier: DigiKey; Supplier Part Number: 732-5317-ND; Manufacturer Part Number: 61300411121; RoHS: Compliant; Category: Headers and Wire Housings; Stock: 50159; Pricing: 1=0.17, 10=0.147, 25=0.1216, 50=0.1018, 100=0.0918, 1000=0.085 (USD); Color: Black; Contact Material: Gold; Contact Mating Length: 5.9944mm; Contact Plating: Gold; Height: 8.89mm; Lead Free: Lead Free; Lead Pitch: 2.54mm; Length: 10.16mm; Max Operating Temperature: 105°C; Min Operating Temperature: -40°C; Mounting Technology: Through Hole; Pins: 4; Number of Positions: 4; Number of Rows: 1; Orientation: Vertical; Packaging: Bulk; Pitch: 2.54mm; Termination: Solder; Voltage Rating: 250V; ComponentLink1URL: https://datasheet.octopart.com:443/61300411121-W%C3%BCrth-Elektronik-datasheet-44382959.pdf?src-supplier=Future+Electronics; ComponentLink1Description: https://datasheet.octopart.com:443/61300411121-W%C3%BCrth-Elektronik-datasheet-44382959.pdf?src-supplier=Future+Electronics; ComponentLink2URL: https://datasheet.octopart.com:443/61300411121-Wurth-Elektronik-datasheet-169474491.pdf?src-supplier=Wurth+Elektronik; ComponentLink2Description: https://datasheet.octopart.com:443/61300411121-Wurth-Elektronik-datasheet-169474491.pdf?src-supplier=Wurth+Elektronik; ComponentLink3URL: https://datasheet.octopart.com:443/61300411121-W%C3%BCrth-Elektronik-datasheet-149524049.pdf?src-supplier=Farnell; ComponentLink3Description: https://datasheet.octopart.com:443/61300411121-W%C3%BCrth-Elektronik-datasheet-149524049.pdf?src-supplier=Farnell; ComponentLink4URL: https://datasheet.octopart.com:443/61300411121-W%C3%BCrth-Elektronik-datasheet-21154836.pdf?src-supplier=element14+APAC; ComponentLink4Description: https://datasheet.octopart.com:443/61300411121-W%C3%BCrth-Elektronik-datasheet-21154836.pdf?src-supplier=element14+APAC; Supplier 1: DigiKey; Supplier Part Number 1: 732-5317-ND; Supplier 2: Mouser; Supplier Part Number 2: 710-61300411121
footprint 61300411121 (Pin Header, pitch 2.54 mm, THT, Vertical, single row, 4p)
pins: 1, 2, 3, 4

## 61300611121
designator J?
Conn Unshrouded Header HDR 6 POS 2.54mm Solder ST Top Entry Thru-Hole Bag; Manufacturer: Wurth Elektronik; Connector Type: Male Pin; Contact Resistance: 20mΩ; Current Rating: 3A; Gender: Male; Insulation Resistance: 1GΩ; Number of Contacts: 6; Operating Supply Voltage: 250V; Supplier 1: DigiKey; Supplier Part Number 1: 732-5319-ND; Supplier 2: Mouser; Supplier Part Number 2: 710-61300611121; Supplier: DigiKey; Supplier Part Number: 732-5319-ND; Manufacturer Part Number: 61300611121; RoHS: Compliant; Category: Headers and Wire Housings; Stock: 64147; Pricing: 1=0,31, 10=0,268, 25=0,2224, 50=0,1864, 100=0,1683, 1000=0,1539 (USD); Color: Black; Contact Gender: Male; Contact Material: Gold; Contact Mating Length: 5.9944mm; Contact Plating: Gold; Height: 8.89mm; Housing Material: PBT; Lead Free: Lead Free; Lead Pitch: 2.54mm; Length: 15.24mm; Max Operating Temperature: 105°C; Min Operating Temperature: -40°C; Mounting Technology: Through Hole; Pins: 6; Number of Positions: 6; Number of Rows: 1; Orientation: Vertical; Packaging: Bulk; Pitch: 2.54mm; Termination: Through Hole; Voltage Rating: 250V; ComponentLink1URL: https://datasheet.octopart.com:443/61300611121-Wurth-Elektronik-datasheet-190366223.pdf?src-supplier=Wurth+Elektronik; ComponentLink1Description: https://datasheet.octopart.com:443/61300611121-Wurth-Elektronik-datasheet-190366223.pdf?src-supplier=Wurth+Elektronik; ComponentLink2URL: https://datasheet.octopart.com:443/61300611121-W%C3%BCrth-Elektronik-datasheet-44382959.pdf?src-supplier=Future+Electronics; ComponentLink2Description: https://datasheet.octopart.com:443/61300611121-W%C3%BCrth-Elektronik-datasheet-44382959.pdf?src-supplier=Future+Electronics; ComponentLink3URL: https://datasheet.octopart.com:443/61300611121-W%C3%BCrth-Elektronik-datasheet-149524072.pdf?src-supplier=Farnell; ComponentLink3Description: https://datasheet.octopart.com:443/61300611121-W%C3%BCrth-Elektronik-datasheet-149524072.pdf?src-supplier=Farnell; ComponentLink4URL: https://datasheet.octopart.com:443/61300611121-Wurth-Elektronik-datasheet-181533275.pdf?src-supplier=Farnell; ComponentLink4Description: https://datasheet.octopart.com:443/61300611121-Wurth-Elektronik-datasheet-181533275.pdf?src-supplier=Farnell; ComponentLink5URL: https://datasheet.octopart.com:443/61300611121-W%C3%BCrth-Elektronik-datasheet-21154836.pdf?src-supplier=element14+APAC; ComponentLink5Description: https://datasheet.octopart.com:443/61300611121-W%C3%BCrth-Elektronik-datasheet-21154836.pdf?src-supplier=element14+APAC
footprint 61300611121
pins: 1, 2, 3, 4, 5, 6

## 687124149022
designator J?
FFC/FPC Connector, 24 Contact(s), 1 Row(s), Female, Right Angle, Surface Mount Terminal; Manufacturer: Wurth Electronics; Connector Type: CARD EDGE CONNECTOR; Option: General Purpose; Filter Feature: No; Number of Rows Loaded: 1; Number of Contacts: 24; Supplier: Mouser; Supplier Part Number: 710-687124149022; Manufacturer Part Number: 687124149022; RoHS: Yes; Category: FFC / FPC; Stock: 4411; Pricing: 1=1.78, 10=1.78, 50=1.7, 100=1.58, 1000=1.15, 10000=1.14 (USD); Mounting Technology: Board; Contact Finish - Mating: NOT SPECIFIED; Contact Gender: Female; Mixed Contacts: No; Mounting Style: RIGHT ANGLE; Termination: SMD/SMT; Terminal Pitch: 0.5mm; Flammability Rating: UL94 V-0; DIN Conformance: No; IEC Conformance: No; MIL Conformance: No; Reach SVHC Compliant: Yes; RoHS Compliant: Yes; ComponentLink1URL: https://datasheet.ciiva.com:443/pdfs/VipMasterIC/IC/MIDC/MIDC-S-A0006743625/MIDC-S-A0006743390-1.pdf?src-supplier=IHS+Markit; ComponentLink1Description: https://datasheet.ciiva.com:443/pdfs/VipMasterIC/IC/MIDC/MIDC-S-A0006743625/MIDC-S-A0006743390-1.pdf?src-supplier=IHS+Markit; ComponentLink2URL: https://media.digikey.com/pdf/Data%20Sheets/Wurth%20Electronics%20PDFs/WR-FPC_FFC_Flyer.pdf?src-supplier=Digikey; ComponentLink2Description: https://media.digikey.com/pdf/Data%20Sheets/Wurth%20Electronics%20PDFs/WR-FPC_FFC_Flyer.pdf?src-supplier=Digikey; ComponentLink3URL: https://www.distrelec.bizhttp://katalog.we-online.de/em/datasheet/6871xx149022.pdf?mime=application%2Fpdf&src-supplier=Distrelec; ComponentLink3Description: https://www.distrelec.bizhttp://katalog.we-online.de/em/datasheet/6871xx149022.pdf?mime=application%2Fpdf&src-supplier=Distrelec; ComponentLink4URL: http://www.farnell.com/cad/2130958.pdf?src-supplier=Element14; ComponentLink4Description: http://www.farnell.com/cad/2130958.pdf?src-supplier=Element14; ComponentLink5URL: http://www.farnell.com/cad/1889789.pdf?src-supplier=Element14; ComponentLink5Description: http://www.farnell.com/cad/1889789.pdf?src-supplier=Element14; Supplier 1: Mouser; Supplier Part Number 1: 710-687124149022; Supplier 2: Digikey; Supplier Part Number 2: 732-6004-1-ND
footprint 687124149022
pins: 1 NC, 2 GDR, 3 RESE, 4 NC, 5 VSH2, 6 TSCL, 7 TSDA, 8 BS, 9 BUSY, 10 RES, 11 D/C, 12 CS, 13 SCLK, 14 SDI, 15 VDDIO, 16 VCI, 17 VSS, 18 VDD, 19 VPP, 20 VSH1, 21 VGH, 22 VSL, 23 VGL, 24 VCOM, 25 GND_PAD, 26 GND_PAD

## AAT1556-WSC-T
designator U?  Manufacturer Part Number: AAT1556-WSC-T  (hidden comment: *)
AAT1556-WSC-T Display Bias IC; Manufacturer: TBD
pins: A1 VINA, A2 AVDD, A3 EN, B1 VINP, B2 AGND, B3 SRL, C1 LX1, C2 PGND_1, C3 TGND, D1 LX2, D2 VON_1, D3 VON_2, E1 PGND_2, E2 MODE2, E3 MODE1, F1 VOP, F2 OVDD, F3 OVSS

## ABM11W-48.0000MHZ-7-B1U-T3
designator X?
Crystal, Quartz, 48 MHz, SMD, 2mm x 1.6mm x 0.5mm, 10 ppm, 7 pF, 10 ppm, ABM11W; Manufacturer: Abracon; ESR (Equivalent Series Resistance): 60Ω; Frequency: 48MHz; Frequency Stability: 10ppm; Frequency Tolerance: 0.001%; Load Capacitance: 7pF; Supplier 1: DigiKey; Supplier Part Number 1: 535-13925-1-ND; Supplier 2: DigiKey; Supplier Part Number 2: 535-13925-6-ND; Supplier 3: Mouser; Supplier Part Number 3: 815-11W48-7B1UT; Supplier: DigiKey; Supplier Part Number: 535-13925-1-ND; Manufacturer Part Number: ABM11W-48.0000MHZ-7-B1U-T3; RoHS: Compliant; Category: Crystals; Stock: 42097; Pricing: 1=0,34, 10=0,3, 25=0,2836, 50=0,2718, 100=0,2606, 250=0,24648, 500=0,23628, 1000=0,2265 (USD); China RoHS: Compliant; Country of Origin: Taiwan; Height: 500µm; Harmonized Tariff Schedule (HTS) Code: 8541.60.00.60; Introduction Date: 2018-02-12; Length: 2mm; Lifecycle Status: Production; Max Operating Temperature: 70°C; Min Operating Temperature: -20°C; Mounting Technology: Surface Mount; REACH SVHC: Yes; Schedule B: 8541600060|8541600060|8541600060|8541600060|8541600060; ESR: 60Ω; Tolerance: 0.001%; Width: 1.6mm; ComponentLink1URL: https://datasheet.octopart.com:443/ABM11W-48.0000MHZ-7-B1U-T3-Abracon-datasheet-154833168.pdf?src-supplier=IHS; ComponentLink1Description: https://datasheet.octopart.com:443/ABM11W-48.0000MHZ-7-B1U-T3-Abracon-datasheet-154833168.pdf?src-supplier=IHS; ComponentLink2URL: https://datasheet.octopart.com:443/ABM11W-48.0000MHZ-7-B1U-T3-Abracon-datasheet-102760955.pdf?src-supplier=Future+Electronics; ComponentLink2Description: https://datasheet.octopart.com:443/ABM11W-48.0000MHZ-7-B1U-T3-Abracon-datasheet-102760955.pdf?src-supplier=Future+Electronics; ComponentLink3URL: https://datasheet.octopart.com:443/ABM11W-48.0000MHZ-7-B1U-T3-Abracon-datasheet-112015802.pdf?src-supplier=JRH+Electronics; ComponentLink3Description: https://datasheet.octopart.com:443/ABM11W-48.0000MHZ-7-B1U-T3-Abracon-datasheet-112015802.pdf?src-supplier=JRH+Electronics; ComponentLink4URL: https://datasheet.octopart.com:443/ABM11W-48.0000MHZ-7-B1U-T3-Abracon-datasheet-182204996.pdf?src-supplier=Master+Electronics; ComponentLink4Description: https://datasheet.octopart.com:443/ABM11W-48.0000MHZ-7-B1U-T3-Abracon-datasheet-182204996.pdf?src-supplier=Master+Electronics; ComponentLink5URL: https://sigma.octopart.com:443/141159858/technical_drawing/Abracon-ABM11W-48.0000MHZ-7-B1U-T3.pdf?src-supplier=Abracon+SCT; ComponentLink5Description: https://sigma.octopart.com:443/141159858/technical_drawing/Abracon-ABM11W-48.0000MHZ-7-B1U-T3.pdf?src-supplier=Abracon+SCT; ComponentLink6URL: http://sigma.octopart.com:80/conflict_mineral_statement/Abracon-company-27.pdf?src-supplier=Compliance+Statements; ComponentLink6Description: http://sigma.octopart.com:80/conflict_mineral_statement/Abracon-company-27.pdf?src-supplier=Compliance+Statements
footprint ABM11W-48.0000MHZ-7-B1U-T3
pins: 1, 2, 3, 4

## ABM12W-40.0000MHZ-8-B1U-T3
designator Y?
Crystal, Quartz, 40 MHz, SMD, 1.6mm x 1.2mm x 0.4mm, 10 ppm, 8 pF, 10 ppm, ABM12W; Manufacturer: Abracon; ESR (Equivalent Series Resistance): 80Ω; Frequency: 40MHz; Frequency Stability: 10ppm; Frequency Tolerance: 0.001%; Load Capacitance: 8pF; Supplier: DigiKey; Supplier Part Number: 535-13991-1-ND; Manufacturer Part Number: ABM12W-40.0000MHZ-8-B1U-T3; RoHS: Compliant; Category: Crystals; Stock: 8820; Pricing: 1=0.92, 10=0.803, 25=0.7596, 50=0.7284, 100=0.6982, 250=0.66028, 500=0.60768, 1000=0.58287 (USD); China RoHS: Compliant; Height: 400µm; Introduction Date: 2018-02-12; Length: 1.6mm; Lifecycle Status: Production; Max Operating Temperature: 70°C; Min Operating Temperature: -20°C; Mounting Technology: Surface Mount; REACH SVHC: Yes; ESR: 80Ω; Tolerance: 0.001%; Width: 1.2mm; ComponentLink1URL: https://datasheet.octopart.com:443/ABM12W-40.0000MHZ-8-B1U-T3-Abracon-datasheet-154833169.pdf?src-supplier=Master+Electronics; ComponentLink1Description: https://datasheet.octopart.com:443/ABM12W-40.0000MHZ-8-B1U-T3-Abracon-datasheet-154833169.pdf?src-supplier=Master+Electronics; ComponentLink2URL: https://datasheet.octopart.com:443/ABM12W-40.0000MHZ-8-B1U-T3-Abracon-datasheet-117059061.pdf?src-supplier=element14+APAC; ComponentLink2Description: https://datasheet.octopart.com:443/ABM12W-40.0000MHZ-8-B1U-T3-Abracon-datasheet-117059061.pdf?src-supplier=element14+APAC; ComponentLink3URL: https://datasheet.octopart.com:443/ABM12W-40.0000MHZ-8-B1U-T3-Abracon-datasheet-102760956.pdf?src-supplier=Sager+Electronics; ComponentLink3Description: https://datasheet.octopart.com:443/ABM12W-40.0000MHZ-8-B1U-T3-Abracon-datasheet-102760956.pdf?src-supplier=Sager+Electronics; ComponentLink4URL: https://sigma.octopart.com:443/141159861/technical_drawing/Abracon-ABM12W-40.0000MHZ-8-B1U-T3.pdf?src-supplier=Abracon+SCT; ComponentLink4Description: https://sigma.octopart.com:443/141159861/technical_drawing/Abracon-ABM12W-40.0000MHZ-8-B1U-T3.pdf?src-supplier=Abracon+SCT; ComponentLink5URL: http://sigma.octopart.com:80/conflict_mineral_statement/Abracon-company-27.pdf?src-supplier=Compliance+Statements; ComponentLink5Description: http://sigma.octopart.com:80/conflict_mineral_statement/Abracon-company-27.pdf?src-supplier=Compliance+Statements; Supplier 1: DigiKey; Supplier Part Number 1: 535-13991-1-ND; Supplier 2: DigiKey; Supplier Part Number 2: 535-13991-2-ND; Supplier 3: Mouser; Supplier Part Number 3: 815-12W40-8B1UT
footprint ABM12W
pins: 1, 2 GND (power), 3, 4 GND (power)